# Altium footprint library NEXUS32.PcbLib: 39 footprints (part 3 of 3)
Each footprint in its own frame and in the unit in brackets; x right, y up, seen from the top. Pads: shape width x height; smd on the part's side, far side on the other; paste and mask are expansions set on the pad; w line width, h text height; cw(c..) or ccw(c..) is an arc to the next point about the centre after c.
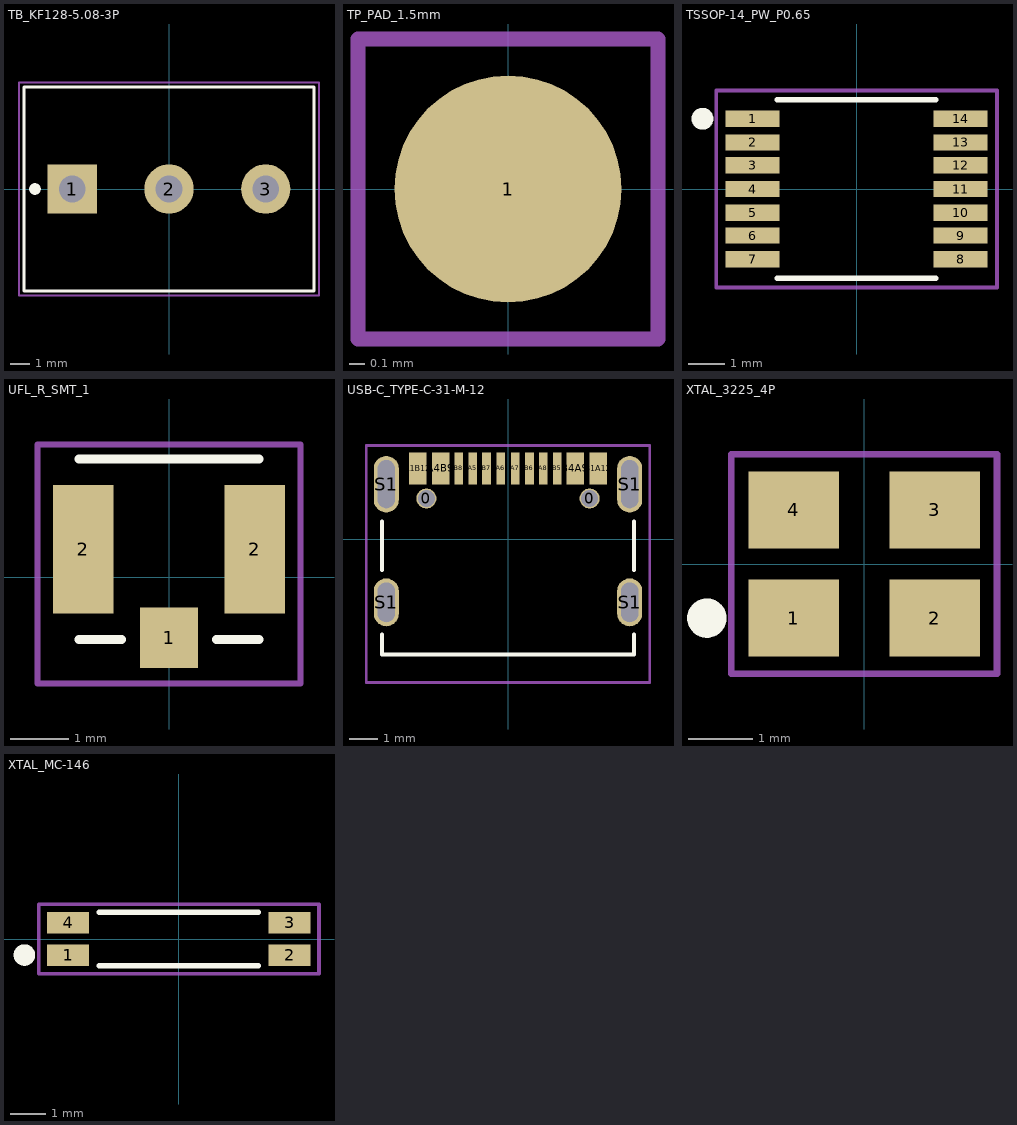
[diagram p2: the footprints below, top view; thin cyan lines are the x and y axes]

## TB_KF128-5.08-3P [mil] "Bornera tornillo 3 polos 5.08mm KF128 (hole 1.4mm, pad 2.6mm)"
height 555.12
pads (3):
  rect 102x102 hole 55: 1(-200,0)
  round 102 hole 55: 2(0,0) 3(200,0)
Top Overlay:
  circle w12: c-277,0 r6
  lines w6: -300,-211 300,-211 300,211 -300,211 -300,-211
Mechanical 1:
  lines w4: -310,-220 310,-220 310,220 -310,220 -310,-220
3D body "TB_KF128-5.08-3P.step": height 555.12, standoff -137.8, extent -323.62,-212.6 300,208.66

## TP_PAD_1.5mm [mil] "Punto de prueba: almohadilla desnuda redonda 1.5 mm (sin pieza)"
pads (1):
  round 59 smd: 1(0,0)
Mechanical 1:
  lines w4: -39,-39 -39,39 39,39 39,-39 -39,-39

## TSSOP-14_PW_P0.65 [mil] "TSSOP-14 TLV9004IPWR"
height 43.31
pads (14):
  rect 59x18 smd: 1(-114,77) 2(-114,51) 3(-114,26) 4(-114,0) 5(-114,-26) 6(-114,-51) 7(-114,-77) 8(114,-77) 9(114,-51) 10(114,-26) 11(114,0) 12(114,26) 13(114,51) 14(114,77)
Top Overlay:
  circle w12: c-169,77 r6
  lines w6: -87,-98 87,-98 ; -87,98 87,98
Mechanical 1:
  lines w4: -154,-108 154,-108 154,108 -154,108 -154,-108
3D body "TSSOP-14_PW_P0.65.step": height 43.31, standoff 0, extent -118.36,-98.43 118.36,98.43

## UFL_R_SMT_1 [mil] "Conector U.FL receptaculo Hirose U.FL-R-SMT-1; pad 1 = senal, pads 2 = GND"
height 49.61
pads (3):
  rect 39x41 smd: 1(0,-41)
  rect 41x87 smd: 2(-58,19) 2(58,19)
Top Overlay:
  lines w6: -61,-42 -32,-42 ; -61,80 61,80 ; 32,-42 61,-42
Mechanical 1:
  lines w4: -89,-72 89,-72 89,90 -89,90 -89,-72
3D body "UFL_R_SMT_1.step": height 49.61, standoff 0, extent -59.06,-66.93 59.06,51.18

## USB-C_TYPE-C-31-M-12 [mil] "Receptaculo USB Type-C 16P SMD HRO TYPE-C-31-M-12 (borde de placa a 6.86 de la fila de pads)"
height 127.99
pads (18):
  round 28 hole 24 unplated: 0(-114,57) 0(114,57)
  rect 24x45 smd: A1B12(-126,99) A4B9(-94,99) B1A12(126,99) B4A9(94,99)
  rect 12x45 smd: A5(-49,99) A6(-10,99) A7(10,99) A8(49,99) B5(69,99) B6(30,99) B7(-30,99) B8(-69,99)
  oval 35x67 hole 24 slot 55.12 at 90 deg: S1(-170,-88) S1(170,-88)
  oval 35x79 hole 24 slot 66.93 at 90 deg: S1(-170,77) S1(170,77)
Top Overlay:
  lines w6: -176,-133 -176,-161 176,-161 176,-133 ; -176,-43 -176,25 ; 176,-43 176,25
Mechanical 1:
  lines w4: -198,-200 -198,131 198,131 198,-200 -198,-200
3D body "USB-C_TYPE-C-31-M-12.step": height 127.99, standoff -33.46, extent -175.98,-190.16 175.98,120.86

## XTAL_3225_4P [mil] "Cristal SMD 3.2x2.5 4 pads YXC YSX321SL (1,3 cristal; 2,4 GND)"
height 27.6
pads (4):
  rect 55x47 smd: 1(-43,-33) 2(43,-33) 3(43,33) 4(-43,33)
Top Overlay:
  circle w12: c-96,-33 r6
Mechanical 1:
  lines w4: -81,-67 81,-67 81,67 -81,67 -81,-67
3D body "XTAL_3225_4P.step": height 27.6, standoff 0, extent -62.99,-49.21 62.99,49.21

## XTAL_MC-146 [mil] "Cristal 32.768kHz Epson MC-146 (terminales #1 y #4 activos; #2/#3 mecanicos)"
height 55.51
pads (4):
  rect 47x24 smd: 1(-124,-18) 2(124,-18) 3(124,18) 4(-124,18)
Top Overlay:
  circle w12: c-173,-18 r6
  lines w6: -89,-30 89,-30 ; -89,30 89,30
Mechanical 1:
  lines w4: -157,-39 157,-39 157,39 -157,39 -157,-39
3D body "XTAL_MC-146.step": height 55.51, standoff 0, extent -133.42,-29.53 133.42,29.53